# Altium footprint library standard-case.PcbLib: 285 footprints (part 8 of 18)
Each footprint in its own frame and in the unit in brackets; x right, y up, seen from the top. Pads: shape width x height; smd on the part's side, far side on the other; paste and mask are expansions set on the pad; w line width, h text height; cw(c..) or ccw(c..) is an arc to the next point about the centre after c.
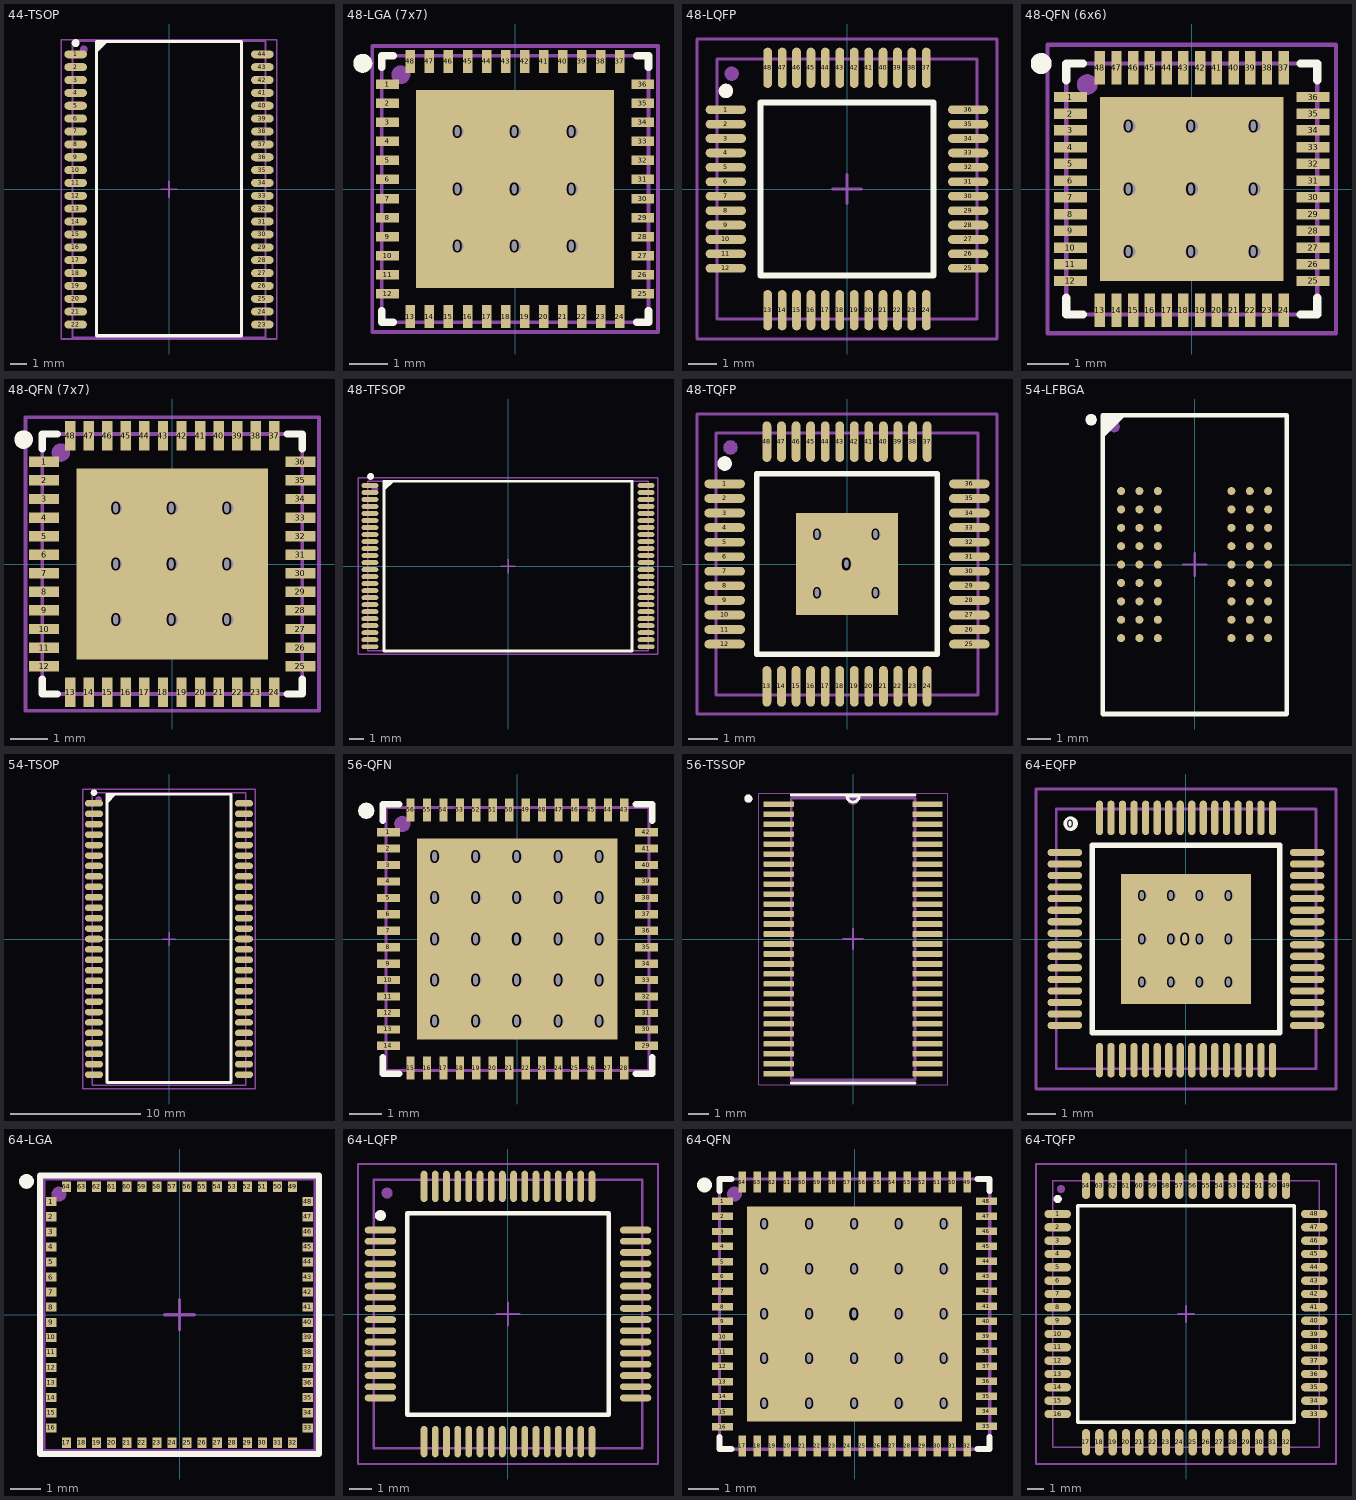
[diagram p7: the footprints below, top view; thin cyan lines are the x and y axes]

## 44-TSOP [mm] "pitch 0.8 mm"
height 5.6
pads (46):
  rrect100% 1.4x0.5 smd: 1(-5.8,8.4) 2(-5.8,7.6) 3(-5.8,6.8) 4(-5.8,6) 5(-5.8,5.2) 6(-5.8,4.4) 7(-5.8,3.6) 8(-5.8,2.8) 9(-5.8,2) 10(-5.8,1.2) 11(-5.8,0.4) 12(-5.8,-0.4) 13(-5.8,-1.2) 14(-5.8,-2) 15(-5.8,-2.8) 16(-5.8,-3.6) 17(-5.8,-4.4) 18(-5.8,-5.2) 19(-5.8,-6) 20(-5.8,-6.8) 21(-5.8,-7.6) 22(-5.8,-8.4) 23(5.8,-8.4) 24(5.8,-7.6) 25(5.8,-6.8) 26(5.8,-6) 27(5.8,-5.2) 28(5.8,-4.4) 29(5.8,-3.6) 30(5.8,-2.8) 31(5.8,-2) 32(5.8,-1.2) 33(5.8,-0.4) 34(5.8,0.4) 35(5.8,1.2) 36(5.8,2) 37(5.8,2.8) 38(5.8,3.6) 39(5.8,4.4) 40(5.8,5.2) 41(5.8,6) 42(5.8,6.8) 43(5.8,7.6) 44(5.8,8.4)
  round 0.5 on Top Overlay: ""(-5.8,9.1)
  round 0.5 on Mech1: ""(-5.3,8.7)
Top Overlay:
  region: -4.5,9.2 -4.5,8.48 -3.78,9.2
  lines w0.2: -4.5,-9.1 4.5,-9.1 4.5,9.2 -4.5,9.2 -4.5,-9.1
Mechanical 1:
  lines w0.1: -6,-9.21 6,-9.21 6,9.21 -6,9.21 -6,-9.21
Mechanical 15:
  lines w0.1: -0.5,0 0.5,0 ; 0,-0.5 0,0.5 ; -6.7,-9.3 -6.7,9.3 6.7,9.3 6.7,-9.3 -6.7,-9.3
3D body "User Library-ISSI TSOP II-44.STEP": height 1.2, standoff 0, extent -5.98,-9.26 5.98,9.26

## 48-LGA (7x7) [mm] "7x7 mm, pitch 0.5 mm, power pad"
height 0.75
pads (59):
  round 0.7 hole 0.3: 0(-1.5,-1.5) 0(-1.5,0) 0(-1.5,1.5) 0(0,-1.5) 0(0,0) 0(0,1.5) 0(1.5,-1.5) 0(1.5,0) 0(1.5,1.5)
  rect 5.2x5.2 smd mask+0.05: 0(0,0)
  rect 0.6x0.25 smd mask+0.05: 1(-3.35,2.75) 2(-3.35,2.25) 3(-3.35,1.75) 4(-3.35,1.25) 5(-3.35,0.75) 6(-3.35,0.25) 7(-3.35,-0.25) 8(-3.35,-0.75) 9(-3.35,-1.25) 10(-3.35,-1.75) 11(-3.35,-2.25) 12(-3.35,-2.75) 25(3.35,-2.75) 26(3.35,-2.25) 27(3.35,-1.75) 28(3.35,-1.25) 29(3.35,-0.75) 30(3.35,-0.25) 31(3.35,0.25) 32(3.35,0.75) 33(3.35,1.25) 34(3.35,1.75) 35(3.35,2.25) 36(3.35,2.75)
  rect 0.25x0.6 smd mask+0.05: 13(-2.75,-3.35) 14(-2.25,-3.35) 15(-1.75,-3.35) 16(-1.25,-3.35) 17(-0.75,-3.35) 18(-0.25,-3.35) 19(0.25,-3.35) 20(0.75,-3.35) 21(1.25,-3.35) 22(1.75,-3.35) 23(2.25,-3.35) 24(2.75,-3.35) 37(2.75,3.35) 38(2.25,3.35) 39(1.75,3.35) 40(1.25,3.35) 41(0.75,3.35) 42(0.25,3.35) 43(-0.25,3.35) 44(-0.75,3.35) 45(-1.25,3.35) 46(-1.75,3.35) 47(-2.25,3.35) 48(-2.75,3.35)
  round 0.5 on Mech1: ""(-3,3)
Top Overlay:
  circle w0.25: c-4,3.3 r0.125
  lines w0.2: -3.5,-3.2 -3.5,-3.5 -3.2,-3.5 ; -3.5,3.2 -3.5,3.5 -3.2,3.5 ; 3.2,-3.5 3.5,-3.5 3.5,-3.2 ; 3.2,3.5 3.5,3.5 3.5,3.2
Mechanical 1:
  lines w0.1: -3.5,-3.5 -3.5,3.5 3.5,3.5 3.5,-3.5 -3.5,-3.5
Mechanical 15:
  lines w0.1: -0.5,0 0.5,0 ; 0,-0.5 0,0.5 ; -3.75,-3.75 -3.75,3.75 3.75,3.75 3.75,-3.75 -3.75,-3.75
3D body "ESP v4.step": height 1, standoff 0.06, extent -3.5,-3.5 3.5,3.5

## 48-LQFP [mm] "QFP, 48-Leads, Body 7x7mm, Pitch 0.5mm, IPC Medium Density"
height 1.6
pads (49):
  oval 1.4x0.3 smd: 1(-4.2,2.75) 2(-4.2,2.25) 3(-4.2,1.75) 4(-4.2,1.25) 5(-4.2,0.75) 6(-4.2,0.25) 7(-4.2,-0.25) 8(-4.2,-0.75) 9(-4.2,-1.25) 10(-4.2,-1.75) 11(-4.2,-2.25) 12(-4.2,-2.75) 25(4.2,-2.75) 26(4.2,-2.25) 27(4.2,-1.75) 28(4.2,-1.25) 29(4.2,-0.75) 30(4.2,-0.25) 31(4.2,0.25) 32(4.2,0.75) 33(4.2,1.25) 34(4.2,1.75) 35(4.2,2.25) 36(4.2,2.75)
  oval 0.3x1.4 smd: 13(-2.75,-4.2) 14(-2.25,-4.2) 15(-1.75,-4.2) 16(-1.25,-4.2) 17(-0.75,-4.2) 18(-0.25,-4.2) 19(0.25,-4.2) 20(0.75,-4.2) 21(1.25,-4.2) 22(1.75,-4.2) 23(2.25,-4.2) 24(2.75,-4.2) 37(2.75,4.2) 38(2.25,4.2) 39(1.75,4.2) 40(1.25,4.2) 41(0.75,4.2) 42(0.25,4.2) 43(-0.25,4.2) 44(-0.75,4.2) 45(-1.25,4.2) 46(-1.75,4.2) 47(-2.25,4.2) 48(-2.75,4.2)
  round 0.5 on Mech1: ""(-4,4)
Top Overlay:
  circle w0.25: c-4.2,3.4 r0.125
  lines w0.2: -3,-3 -3,3 3,3 3,-3 -3,-3
Mechanical 1:
  lines w0.1: -4.5,-4.5 -4.5,4.5 4.5,4.5 4.5,-4.5 -4.5,-4.5
Mechanical 15:
  lines w0.1: -0.5,0 0.5,0 ; 0,-0.5 0,0.5 ; -5.2,-5.2 -5.2,5.2 5.2,5.2 5.2,-5.2 -5.2,-5.2
3D body "STM32F334.step": height 1.6, standoff 0, extent -4.5,-4.5 4.5,4.5

## 48-QFN (6x6) [mm] "6x6 mm, pitch 0.4 mm, power pad"
height 0.85
pads (59):
  round 0.7 hole 0.3: 0(-1.5,-1.5) 0(-1.5,0) 0(-1.5,1.5) 0(0,-1.5) 0(0,0) 0(0,1.5) 0(1.5,-1.5) 0(1.5,0) 0(1.5,1.5)
  rect 4.4x4.4 smd: 0(0,0)
  rect 0.8x0.25 smd: 1(-2.9,2.2) 2(-2.9,1.8) 3(-2.9,1.4) 4(-2.9,1) 5(-2.9,0.6) 6(-2.9,0.2) 7(-2.9,-0.2) 8(-2.9,-0.6) 9(-2.9,-1) 10(-2.9,-1.4) 11(-2.9,-1.8) 12(-2.9,-2.2) 25(2.9,-2.2) 26(2.9,-1.8) 27(2.9,-1.4) 28(2.9,-1) 29(2.9,-0.6) 30(2.9,-0.2) 31(2.9,0.2) 32(2.9,0.6) 33(2.9,1) 34(2.9,1.4) 35(2.9,1.8) 36(2.9,2.2)
  rect 0.25x0.8 smd: 13(-2.2,-2.9) 14(-1.8,-2.9) 15(-1.4,-2.9) 16(-1,-2.9) 17(-0.6,-2.9) 18(-0.2,-2.9) 19(0.2,-2.9) 20(0.6,-2.9) 21(1,-2.9) 22(1.4,-2.9) 23(1.8,-2.9) 24(2.2,-2.9) 37(2.2,2.9) 38(1.8,2.9) 39(1.4,2.9) 40(1,2.9) 41(0.6,2.9) 42(0.2,2.9) 43(-0.2,2.9) 44(-0.6,2.9) 45(-1,2.9) 46(-1.4,2.9) 47(-1.8,2.9) 48(-2.2,2.9)
  round 0.5 on Mech1 mask+0: ""(-2.5,2.5)
Top Overlay:
  circle w0.25: c-3.6,3 r0.125
  lines w0.2: -3,-2.6 -3,-3 -2.6,-3 ; -3,2.6 -3,3 -2.6,3 ; 2.6,-3 3,-3 3,-2.6 ; 2.6,3 3,3 3,2.6
Mechanical 1:
  lines w0.1: -3,-3 -3,3 3,3 3,-3 -3,-3
Mechanical 15:
  lines w0.1: -0.5,0 0.5,0 ; 0,-0.5 0,0.5 ; -3.45,-3.45 -3.45,3.45 3.45,3.45 3.45,-3.45 -3.45,-3.45
3D body "48-VFQFN (6x6).step": height 0.85, standoff 0, extent -3.02,-3.02 3.02,3.02

## 48-QFN (7x7) [mm] "7x7 mm, pitch 0.5 mm, power pad"
height 0.75
pads (59):
  round 0.7 hole 0.3: 0(-1.5,-1.5) 0(-1.5,0) 0(-1.5,1.5) 0(0,-1.5) 0(0,0) 0(0,1.5) 0(1.5,-1.5) 0(1.5,0) 0(1.5,1.5)
  rect 5.15x5.15 smd mask+0.05: 0(0,0)
  rect 0.8x0.28 smd mask+0.05: 1(-3.45,2.75) 2(-3.45,2.25) 3(-3.45,1.75) 4(-3.45,1.25) 5(-3.45,0.75) 6(-3.45,0.25) 7(-3.45,-0.25) 8(-3.45,-0.75) 9(-3.45,-1.25) 10(-3.45,-1.75) 11(-3.45,-2.25) 12(-3.45,-2.75) 25(3.45,-2.75) 26(3.45,-2.25) 27(3.45,-1.75) 28(3.45,-1.25) 29(3.45,-0.75) 30(3.45,-0.25) 31(3.45,0.25) 32(3.45,0.75) 33(3.45,1.25) 34(3.45,1.75) 35(3.45,2.25) 36(3.45,2.75)
  rect 0.28x0.8 smd mask+0.05: 13(-2.75,-3.45) 14(-2.25,-3.45) 15(-1.75,-3.45) 16(-1.25,-3.45) 17(-0.75,-3.45) 18(-0.25,-3.45) 19(0.25,-3.45) 20(0.75,-3.45) 21(1.25,-3.45) 22(1.75,-3.45) 23(2.25,-3.45) 24(2.75,-3.45) 37(2.75,3.45) 38(2.25,3.45) 39(1.75,3.45) 40(1.25,3.45) 41(0.75,3.45) 42(0.25,3.45) 43(-0.25,3.45) 44(-0.75,3.45) 45(-1.25,3.45) 46(-1.75,3.45) 47(-2.25,3.45) 48(-2.75,3.45)
  round 0.5 on Mech1: ""(-3,3)
Top Overlay:
  circle w0.25: c-4,3.35 r0.125
  lines w0.2: -3.5,-3.1 -3.5,-3.5 -3.1,-3.5 ; -3.5,3.1 -3.5,3.5 -3.1,3.5 ; 3.1,-3.5 3.5,-3.5 3.5,-3.1 ; 3.1,3.5 3.5,3.5 3.5,3.1
Mechanical 1:
  lines w0.1: -3.5,-3.5 -3.5,3.5 3.5,3.5 3.5,-3.5 -3.5,-3.5
Mechanical 15:
  lines w0.1: -0.5,0 0.5,0 ; 0,-0.5 0,0.5 ; -3.95,-3.95 -3.95,3.95 3.95,3.95 3.95,-3.95 -3.95,-3.95
3D body "User Library-QFN48_7x7.STEP": height 0.78, standoff -0.02, extent -3.51,-3.51 3.51,3.51

## 48-TFSOP [mm] "pitch 0.5 mm"
height 1.2
pads (50):
  oval 1.2x0.35 smd: 1(-9.85,5.75) 2(-9.85,5.25) 3(-9.85,4.75) 4(-9.85,4.25) 5(-9.85,3.75) 6(-9.85,3.25) 7(-9.85,2.75) 8(-9.85,2.25) 9(-9.85,1.75) 10(-9.85,1.25) 11(-9.85,0.75) 12(-9.85,0.25) 13(-9.85,-0.25) 14(-9.85,-0.75) 15(-9.85,-1.25) 16(-9.85,-1.75) 17(-9.85,-2.25) 18(-9.85,-2.75) 19(-9.85,-3.25) 20(-9.85,-3.75) 21(-9.85,-4.25) 22(-9.85,-4.75) 23(-9.85,-5.25) 24(-9.85,-5.75) 25(9.85,-5.75) 26(9.85,-5.25) 27(9.85,-4.75) 28(9.85,-4.25) 29(9.85,-3.75) 30(9.85,-3.25) 31(9.85,-2.75) 32(9.85,-2.25) 33(9.85,-1.75) 34(9.85,-1.25) 35(9.85,-0.75) 36(9.85,-0.25) 37(9.85,0.25) 38(9.85,0.75) 39(9.85,1.25) 40(9.85,1.75) 41(9.85,2.25) 42(9.85,2.75) 43(9.85,3.25) 44(9.85,3.75) 45(9.85,4.25) 46(9.85,4.75) 47(9.85,5.25) 48(9.85,5.75)
  round 0.5 on Mech1: 2(-9.5,5.5)
  round 0.5 on Top Overlay: ""(-9.8,6.4)
Top Overlay:
  region: -8.85,6.05 -8.85,5.33 -8.13,6.05
  lines w0.2: -8.85,-6.05 -8.85,6.05 8.85,6.05 8.85,-6.05 -8.85,-6.05
Mechanical 1:
  lines w0.1: -10,-6.05 -10,6.05 10,6.05 10,-6.05 -10,-6.05
Mechanical 15:
  lines w0.1: -0.5,0 0.5,0 ; 0,-0.5 0,0.5 ; -10.7,-6.3 -10.7,6.3 10.7,6.3 10.7,-6.3 -10.7,-6.3
3D body "48-TFSOP.step": height 1.2, standoff 0, extent -10,-6.05 10,6.05

## 48-TQFP [mm] "pitch 0.5 mm, power pad"
height 1.2
pads (55):
  round 0.7 hole 0.3: 0(-1,-1) 0(-1,1) 0(0,0) 0(1,-1) 0(1,1)
  rect 3.5x3.5 smd: 0(0,0)
  oval 1.4x0.3 smd: 1(-4.2,2.75) 2(-4.2,2.25) 3(-4.2,1.75) 4(-4.2,1.25) 5(-4.2,0.75) 6(-4.2,0.25) 7(-4.2,-0.25) 8(-4.2,-0.75) 9(-4.2,-1.25) 10(-4.2,-1.75) 11(-4.2,-2.25) 12(-4.2,-2.75) 25(4.2,-2.75) 26(4.2,-2.25) 27(4.2,-1.75) 28(4.2,-1.25) 29(4.2,-0.75) 30(4.2,-0.25) 31(4.2,0.25) 32(4.2,0.75) 33(4.2,1.25) 34(4.2,1.75) 35(4.2,2.25) 36(4.2,2.75)
  oval 0.3x1.4 smd: 13(-2.75,-4.2) 14(-2.25,-4.2) 15(-1.75,-4.2) 16(-1.25,-4.2) 17(-0.75,-4.2) 18(-0.25,-4.2) 19(0.25,-4.2) 20(0.75,-4.2) 21(1.25,-4.2) 22(1.75,-4.2) 23(2.25,-4.2) 24(2.75,-4.2) 37(2.75,4.2) 38(2.25,4.2) 39(1.75,4.2) 40(1.25,4.2) 41(0.75,4.2) 42(0.25,4.2) 43(-0.25,4.2) 44(-0.75,4.2) 45(-1.25,4.2) 46(-1.75,4.2) 47(-2.25,4.2) 48(-2.75,4.2)
  round 0.5 on Mech1: ""(-4,4)
Top Overlay:
  circle w0.25: c-4.2,3.45 r0.125
  lines w0.2: -3.1,-3.1 -3.1,3.1 3.1,3.1 3.1,-3.1 -3.1,-3.1
Mechanical 1:
  lines w0.1: -4.5,-4.5 -4.5,4.5 4.5,4.5 4.5,-4.5 -4.5,-4.5
Mechanical 15:
  lines w0.1: -0.5,0 0.5,0 ; 0,-0.5 0,0.5 ; -5.15,-5.15 -5.15,5.15 5.15,5.15 5.15,-5.15 -5.15,-5.15
3D body "48-TQFP.step": height 1.2, standoff 0, extent -4.5,-4.5 4.5,4.5

## 54-LFBGA [mm] "pitch 0.8 mm"
pads (56):
  round 0.35 smd: A1(-3.2,3.2) A2(-2.4,3.2) A3(-1.6,3.2) A7(1.6,3.2) A8(2.4,3.2) A9(3.2,3.2) B1(-3.2,2.4) B2(-2.4,2.4) B3(-1.6,2.4) B7(1.6,2.4) B8(2.4,2.4) B9(3.2,2.4) C1(-3.2,1.6) C2(-2.4,1.6) C3(-1.6,1.6) C7(1.6,1.6) C8(2.4,1.6) C9(3.2,1.6) D1(-3.2,0.8) D2(-2.4,0.8) D3(-1.6,0.8) D7(1.6,0.8) D8(2.4,0.8) D9(3.2,0.8) E1(-3.2,0) E2(-2.4,0) E3(-1.6,0) E7(1.6,0) E8(2.4,0) E9(3.2,0) F1(-3.2,-0.8) F2(-2.4,-0.8) F3(-1.6,-0.8) F7(1.6,-0.8) F8(2.4,-0.8) F9(3.2,-0.8) G1(-3.2,-1.6) G2(-2.4,-1.6) G3(-1.6,-1.6) G7(1.6,-1.6) G8(2.4,-1.6) G9(3.2,-1.6) H1(-3.2,-2.4) H2(-2.4,-2.4) H3(-1.6,-2.4) H7(1.6,-2.4) H8(2.4,-2.4) H9(3.2,-2.4) J1(-3.2,-3.2) J2(-2.4,-3.2) J3(-1.6,-3.2) J7(1.6,-3.2) J8(2.4,-3.2) J9(3.2,-3.2)
  round 0.5 on Top Overlay: ""(-4.5,6.3)
  round 0.5 on Mech1: ""(-3.5,6)
Top Overlay:
  region: -4,6.5 -4,5.5 -3,6.5
  lines w0.2: -4,-6.5 -4,6.5 4,6.5 4,-6.5 0,-6.5 -4,-6.5
Mechanical 1:
  lines w0.1: -4,-6.5 -4,6.5 4,6.5 4,-6.5 -4,-6.5
Mechanical 15:
  lines w0.1: -0.5,0 0.5,0 ; 0,-0.5 0,0.5 ; -4,-6.5 4,-6.5 4,6.5 -4,6.5 -4,-6.5
3D body "777.STEP": height 1.1, standoff 0, extent -4,-6.5 4,6.5

## 54-TSOP [mm] "pitch 0.8 mm"
height 1.2
pads (55):
  oval 1.4x0.5 smd: 1(-5.75,10.4) 2(-5.75,9.6) 3(-5.75,8.8) 4(-5.75,8) 5(-5.75,7.2) 6(-5.75,6.4) 7(-5.75,5.6) 8(-5.75,4.8) 9(-5.75,4) 10(-5.75,3.2) 11(-5.75,2.4) 12(-5.75,1.6) 13(-5.75,0.8) 14(-5.75,0) 15(-5.75,-0.8) 16(-5.75,-1.6) 17(-5.75,-2.4) 18(-5.75,-3.2) 19(-5.75,-4) 20(-5.75,-4.8) 21(-5.75,-5.6) 22(-5.75,-6.4) 23(-5.75,-7.2) 24(-5.75,-8) 25(-5.75,-8.8) 26(-5.75,-9.6) 27(-5.75,-10.4) 28(5.75,-10.4) 29(5.75,-9.6) 30(5.75,-8.8) 31(5.75,-8) 32(5.75,-7.2) 33(5.75,-6.4) 34(5.75,-5.6) 35(5.75,-4.8) 36(5.75,-4) 37(5.75,-3.2) 38(5.75,-2.4) 39(5.75,-1.6) 40(5.75,-0.8) 41(5.75,0) 42(5.75,0.8) 43(5.75,1.6) 44(5.75,2.4) 45(5.75,3.2) 46(5.75,4) 47(5.75,4.8) 48(5.75,5.6) 49(5.75,6.4) 50(5.75,7.2) 51(5.75,8) 52(5.75,8.8) 53(5.75,9.6) 54(5.75,10.4)
  round 0.5 on Mech1: ""(-5.4,10.7)
Top Overlay:
  circle w0.25: c-5.75,11.225 r0.125
  region: -4.75,11.1 -4.75,10.38 -4.03,11.1
  lines w0.2: -4.75,-11 4.75,-11 4.75,11.1 -4.75,11.1 -4.75,-11
Mechanical 1:
  lines w0.1: -5.88,-11.2 5.88,-11.2 5.88,11.2 -5.88,11.2 -5.88,-11.2
Mechanical 15:
  lines w0.1: -0.5,0 0.5,0 ; 0,-0.5 0,0.5 ; -6.6,-11.5 6.6,-11.5 6.6,11.5 -6.6,11.5 -6.6,-11.5
3D body "TSOP-54.step": height 1.2, standoff 0, extent -5.88,-11.2 5.88,11.2

## 56-QFN [mm] "8x8 mm, pitch 0.5 mm, power pad"
pads (84):
  round 0.7 hole 0.3: 0(-2.5,-2.5) 0(-2.5,-1.25) 0(-2.5,0) 0(-2.5,1.25) 0(-2.5,2.5) 0(-1.25,-2.5) 0(-1.25,-1.25) 0(-1.25,0) 0(-1.25,1.25) 0(-1.25,2.5) 0(0,-2.5) 0(0,-1.25) 0(0,0) 0(0,1.25) 0(0,2.5) 0(1.25,-2.5) 0(1.25,-1.25) 0(1.25,0) 0(1.25,1.25) 0(1.25,2.5) 0(2.5,-2.5) 0(2.5,-1.25) 0(2.5,0) 0(2.5,1.25) 0(2.5,2.5)
  rect 6.1x6.1 smd: 0(0,0)
  rect 0.7x0.25 smd: 1(-3.925,3.25) 2(-3.925,2.75) 3(-3.925,2.25) 4(-3.925,1.75) 5(-3.925,1.25) 6(-3.925,0.75) 7(-3.925,0.25) 8(-3.925,-0.25) 9(-3.925,-0.75) 10(-3.925,-1.25) 11(-3.925,-1.75) 12(-3.925,-2.25) 13(-3.925,-2.75) 14(-3.925,-3.25) 29(3.925,-3.25) 30(3.925,-2.75) 31(3.925,-2.25) 32(3.925,-1.75) 33(3.925,-1.25) 34(3.925,-0.75) 35(3.925,-0.25) 36(3.925,0.25) 37(3.925,0.75) 38(3.925,1.25) 39(3.925,1.75) 40(3.925,2.25) 41(3.925,2.75) 42(3.925,3.25)
  rect 0.25x0.7 smd: 15(-3.25,-3.925) 16(-2.75,-3.925) 17(-2.25,-3.925) 18(-1.75,-3.925) 19(-1.25,-3.925) 20(-0.75,-3.925) 21(-0.25,-3.925) 22(0.25,-3.925) 23(0.75,-3.925) 24(1.25,-3.925) 25(1.75,-3.925) 26(2.25,-3.925) 27(2.75,-3.925) 28(3.25,-3.925) 43(3.25,3.925) 44(2.75,3.925) 45(2.25,3.925) 46(1.75,3.925) 47(1.25,3.925) 48(0.75,3.925) 49(0.25,3.925) 50(-0.25,3.925) 51(-0.75,3.925) 52(-1.25,3.925) 53(-1.75,3.925) 54(-2.25,3.925) 55(-2.75,3.925) 56(-3.25,3.925)
  round 0.5 on Top Overlay: ""(-4.6,3.9)
  round 0.5 on Mech1: ""(-3.5,3.5)
Top Overlay:
  lines w0.2: -4.1,-3.6 -4.1,-4.1 -3.6,-4.1 ; -4.1,3.6 -4.1,4.1 -3.6,4.1 ; 3.6,-4.1 4.1,-4.1 4.1,-3.6 ; 3.6,4.1 4.1,4.1 4.1,3.6
Mechanical 1:
  lines w0.1: -4,4 4,4 4,-4 -4,-4 -4,4
Mechanical 15:
  lines w0.1: -0.5,0 0.5,0 ; 0,-0.5 0,0.5 ; -4,-4 4,-4 4,4 -4,4 -4,-4
3D body "User Library-TQFN56.STEP": height 0.77, standoff 0, extent -4,-4 4,4

## 56-TSSOP [mm] "pitch 0.8 mm"
height 1.2
pads (56):
  rrect25% 1.52x0.28 smd: 1(-3.725,6.75) 2(-3.725,6.25) 3(-3.725,5.75) 4(-3.725,5.25) 5(-3.725,4.75) 6(-3.725,4.25) 7(-3.725,3.75) 8(-3.725,3.25) 9(-3.725,2.75) 10(-3.725,2.25) 11(-3.725,1.75) 12(-3.725,1.25) 13(-3.725,0.75) 14(-3.725,0.25) 15(-3.725,-0.25) 16(-3.725,-0.75) 17(-3.725,-1.25) 18(-3.725,-1.75) 19(-3.725,-2.25) 20(-3.725,-2.75) 21(-3.725,-3.25) 22(-3.725,-3.75) 23(-3.725,-4.25) 24(-3.725,-4.75) 25(-3.725,-5.25) 26(-3.725,-5.75) 27(-3.725,-6.25) 28(-3.725,-6.75) 29(3.725,-6.75) 30(3.725,-6.25) 31(3.725,-5.75) 32(3.725,-5.25) 33(3.725,-4.75) 34(3.725,-4.25) 35(3.725,-3.75) 36(3.725,-3.25) 37(3.725,-2.75) 38(3.725,-2.25) 39(3.725,-1.75) 40(3.725,-1.25) 41(3.725,-0.75) 42(3.725,-0.25) 43(3.725,0.25) 44(3.725,0.75) 45(3.725,1.25) 46(3.725,1.75) 47(3.725,2.25) 48(3.725,2.75) 49(3.725,3.25) 50(3.725,3.75) 51(3.725,4.25) 52(3.725,4.75) 53(3.725,5.25) 54(3.725,5.75) 55(3.725,6.25) 56(3.725,6.75)
Top Overlay:
  circle w0.2: c-5.245,7.03 r0.1
  lines w0.127: -3.1,-7.21 3.1,-7.21 ; -3.1,7.21 3.1,7.21
  lines w0.152: -0.305,7.161 ccw(c0,7.161) 0.305,7.161 -0.305,7.161
Mechanical 13:
  circle w0.2: c-5.245,7.03 r0.1
  lines w0: -0.305,7.061 ccw(c0,7.061) 0.305,7.061 -0.305,7.061
  lines w0.127: -3.1,-7.05 -3.1,7.05 3.1,7.05 3.1,-7.05 -3.1,-7.05
Mechanical 15:
  lines w0.05: -4.735,-7.3 -4.735,7.3 4.735,7.3 4.735,-7.3 -4.735,-7.3
  lines w0.1: -0.5,0 0.5,0 ; 0,-0.5 0,0.5
3D body "SN65HVD09DGG.STEP": height 1.2, standoff 0, extent -4.05,-7 4.05,7

## 64-EQFP [mm] "pitch 0.4 mm, power pad"
pads (79):
  round 0.5 on Mech1: 0(-4,4)
  round 0.7 hole 0.3: 0(-1.5,-1.5) 0(-1.5,0) 0(-1.5,1.5) 0(-0.5,-1.5) 0(-0.5,0) 0(-0.5,1.5) 0(0.5,-1.5) 0(0.5,0) 0(0.5,1.5) 0(1.5,-1.5) 0(1.5,0) 0(1.5,1.5)
  rect 4.5x4.5 smd: 0(0,0)
  oval 1.2x0.25 smd: 1(-4.2,3) 2(-4.2,2.6) 3(-4.2,2.2) 4(-4.2,1.8) 5(-4.2,1.4) 6(-4.2,1) 7(-4.2,0.6) 8(-4.2,0.2) 9(-4.2,-0.2) 10(-4.2,-0.6) 11(-4.2,-1) 12(-4.2,-1.4) 13(-4.2,-1.8) 14(-4.2,-2.2) 15(-4.2,-2.6) 16(-4.2,-3) 33(4.2,-3) 34(4.2,-2.6) 35(4.2,-2.2) 36(4.2,-1.8) 37(4.2,-1.4) 38(4.2,-1) 39(4.2,-0.6) 40(4.2,-0.2) 41(4.2,0.2) 42(4.2,0.6) 43(4.2,1) 44(4.2,1.4) 45(4.2,1.8) 46(4.2,2.2) 47(4.2,2.6) 48(4.2,3)
  oval 0.25x1.2 smd: 17(-3,-4.2) 18(-2.6,-4.2) 19(-2.2,-4.2) 20(-1.8,-4.2) 21(-1.4,-4.2) 22(-1,-4.2) 23(-0.6,-4.2) 24(-0.2,-4.2) 25(0.2,-4.2) 26(0.6,-4.2) 27(1,-4.2) 28(1.4,-4.2) 29(1.8,-4.2) 30(2.2,-4.2) 31(2.6,-4.2) 32(3,-4.2) 49(3,4.2) 50(2.6,4.2) 51(2.2,4.2) 52(1.8,4.2) 53(1.4,4.2) 54(1,4.2) 55(0.6,4.2) 56(0.2,4.2) 57(-0.2,4.2) 58(-0.6,4.2) 59(-1,4.2) 60(-1.4,4.2) 61(-1.8,4.2) 62(-2.2,4.2) 63(-2.6,4.2) 64(-3,4.2)
  round 0.5 on Top Overlay: ""(-4,4)
Top Overlay:
  lines w0.2: -3.25,-3.25 -3.25,3.25 3.25,3.25 3.25,-3.25 -3.25,-3.25
Mechanical 1:
  lines w0.1: -4.5,-4.5 4.5,-4.5 4.5,4.5 -4.5,4.5 -4.5,-4.5
Mechanical 15:
  lines w0.1: -0.5,0 0.5,0 ; 0,-0.5 0,0.5 ; -5.2,-5.2 -5.2,5.2 5.2,5.2 5.2,-5.2 -5.2,-5.2
3D body "User Library-EQFP64-1.STEP": height 0.94, standoff -0.01, extent -4.5,-4.5 4.5,4.5

## 64-LGA [mm] "9x9 mm, pitch 0.5 mm"
pads (66):
  rect 0.35x0.3 smd: 1(-4.25,3.75) 2(-4.25,3.25) 3(-4.25,2.75) 4(-4.25,2.25) 5(-4.25,1.75) 6(-4.25,1.25) 7(-4.25,0.75) 8(-4.25,0.25) 9(-4.25,-0.25) 10(-4.25,-0.75) 11(-4.25,-1.25) 12(-4.25,-1.75) 13(-4.25,-2.25) 14(-4.25,-2.75) 15(-4.25,-3.25) 16(-4.25,-3.75) 33(4.25,-3.75) 34(4.25,-3.25) 35(4.25,-2.75) 36(4.25,-2.25) 37(4.25,-1.75) 38(4.25,-1.25) 39(4.25,-0.75) 40(4.25,-0.25) 41(4.25,0.25) 42(4.25,0.75) 43(4.25,1.25) 44(4.25,1.75) 45(4.25,2.25) 46(4.25,2.75) 47(4.25,3.25) 48(4.25,3.75)
  rect 0.3x0.35 smd: 17(-3.75,-4.25) 18(-3.25,-4.25) 19(-2.75,-4.25) 20(-2.25,-4.25) 21(-1.75,-4.25) 22(-1.25,-4.25) 23(-0.75,-4.25) 24(-0.25,-4.25) 25(0.25,-4.25) 26(0.75,-4.25) 27(1.25,-4.25) 28(1.75,-4.25) 29(2.25,-4.25) 30(2.75,-4.25) 31(3.25,-4.25) 32(3.75,-4.25) 49(3.75,4.25) 50(3.25,4.25) 51(2.75,4.25) 52(2.25,4.25) 53(1.75,4.25) 54(1.25,4.25) 55(0.75,4.25) 56(0.25,4.25) 57(-0.25,4.25) 58(-0.75,4.25) 59(-1.25,4.25) 60(-1.75,4.25) 61(-2.25,4.25) 62(-2.75,4.25) 63(-3.25,4.25) 64(-3.75,4.25)
  round 0.5 on Top Overlay: ""(-5.075,4.425)
  round 0.5 on Mech1: ""(-4,4)
Top Overlay:
  lines w0.2: -4.625,-4.625 4.625,-4.625 4.625,4.625 -4.625,4.625 -4.625,-4.625
Mechanical 1:
  lines w0.1: -4.5,-4.5 4.5,-4.5 4.5,4.5 -4.5,4.5 -4.5,-4.5
Mechanical 15:
  lines w0.1: -0.5,0 0.5,0 ; 0,-0.5 0,0.5 ; -4.5,-4.5 4.5,-4.5 4.5,4.5 -4.5,4.5 -4.5,-4.5
3D body "64-LGA.SLDPRT": height 1.05, standoff 0, extent -4.5,-4.5 4.5,4.5

## 64-LQFP [mm] "Thin QFP, 64-Leads, Body 10x10mm, Pitch 0.5mm, IPC Medium Density"
height 1.6
pads (66):
  oval 1.4x0.3 smd: 1(-5.7,3.75) 2(-5.7,3.25) 3(-5.7,2.75) 4(-5.7,2.25) 5(-5.7,1.75) 6(-5.7,1.25) 7(-5.7,0.75) 8(-5.7,0.25) 9(-5.7,-0.25) 10(-5.7,-0.75) 11(-5.7,-1.25) 12(-5.7,-1.75) 13(-5.7,-2.25) 14(-5.7,-2.75) 15(-5.7,-3.25) 16(-5.7,-3.75) 33(5.7,-3.75) 34(5.7,-3.25) 35(5.7,-2.75) 36(5.7,-2.25) 37(5.7,-1.75) 38(5.7,-1.25) 39(5.7,-0.75) 40(5.7,-0.25) 41(5.7,0.25) 42(5.7,0.75) 43(5.7,1.25) 44(5.7,1.75) 45(5.7,2.25) 46(5.7,2.75) 47(5.7,3.25) 48(5.7,3.75)
  oval 0.3x1.4 smd: 17(-3.75,-5.7) 18(-3.25,-5.7) 19(-2.75,-5.7) 20(-2.25,-5.7) 21(-1.75,-5.7) 22(-1.25,-5.7) 23(-0.75,-5.7) 24(-0.25,-5.7) 25(0.25,-5.7) 26(0.75,-5.7) 27(1.25,-5.7) 28(1.75,-5.7) 29(2.25,-5.7) 30(2.75,-5.7) 31(3.25,-5.7) 32(3.75,-5.7) 49(3.75,5.7) 50(3.25,5.7) 51(2.75,5.7) 52(2.25,5.7) 53(1.75,5.7) 54(1.25,5.7) 55(0.75,5.7) 56(0.25,5.7) 57(-0.25,5.7) 58(-0.75,5.7) 59(-1.25,5.7) 60(-1.75,5.7) 61(-2.25,5.7) 62(-2.75,5.7) 63(-3.25,5.7) 64(-3.75,5.7)
  round 0.5 on Top Overlay: ""(-5.7,4.4)
  round 0.5 on Mech1: ""(-5.4,5.4)
Top Overlay:
  lines w0.2: -4.5,-4.5 -4.5,4.5 4.5,4.5 4.5,-4.5 -4.5,-4.5
Mechanical 1:
  lines w0.1: -6,-6 -6,6 6,6 6,-6 -6,-6
Mechanical 15:
  lines w0.1: -0.5,0 0.5,0 ; 0,-0.5 0,0.5 ; -6.7,-6.7 -6.7,6.7 6.7,6.7 6.7,-6.7 -6.7,-6.7
3D body "stm32g474.step": height 1.6, standoff 0, extent -6,-6 6,6

## 64-QFN [mm] "9x9 mm, pitch 0.5 mm, power pad"
height 0.75
pads (92):
  round 0.7 hole 0.3: 0(-3,-3) 0(-3,-1.5) 0(-3,0) 0(-3,1.5) 0(-3,3) 0(-1.5,-3) 0(-1.5,-1.5) 0(-1.5,0) 0(-1.5,1.5) 0(-1.5,3) 0(0,-3) 0(0,-1.5) 0(0,0) 0(0,1.5) 0(0,3) 0(1.5,-3) 0(1.5,-1.5) 0(1.5,0) 0(1.5,1.5) 0(1.5,3) 0(3,-3) 0(3,-1.5) 0(3,0) 0(3,1.5) 0(3,3)
  rect 7.15x7.15 smd paste-2539.97: 0(0,0)
  rect 0.7x0.25 smd: 1(-4.4,3.75) 2(-4.4,3.25) 3(-4.4,2.75) 4(-4.4,2.25) 5(-4.4,1.75) 6(-4.4,1.25) 7(-4.4,0.75) 8(-4.4,0.25) 9(-4.4,-0.25) 10(-4.4,-0.75) 11(-4.4,-1.25) 12(-4.4,-1.75) 13(-4.4,-2.25) 14(-4.4,-2.75) 15(-4.4,-3.25) 16(-4.4,-3.75) 33(4.4,-3.75) 34(4.4,-3.25) 35(4.4,-2.75) 36(4.4,-2.25) 37(4.4,-1.75) 38(4.4,-1.25) 39(4.4,-0.75) 40(4.4,-0.25) 41(4.4,0.25) 42(4.4,0.75) 43(4.4,1.25) 44(4.4,1.75) 45(4.4,2.25) 46(4.4,2.75) 47(4.4,3.25) 48(4.4,3.75)
  rect 0.25x0.7 smd: 17(-3.75,-4.4) 18(-3.25,-4.4) 19(-2.75,-4.4) 20(-2.25,-4.4) 21(-1.75,-4.4) 22(-1.25,-4.4) 23(-0.75,-4.4) 24(-0.25,-4.4) 25(0.25,-4.4) 26(0.75,-4.4) 27(1.25,-4.4) 28(1.75,-4.4) 29(2.25,-4.4) 30(2.75,-4.4) 31(3.25,-4.4) 32(3.75,-4.4) 49(3.75,4.4) 50(3.25,4.4) 51(2.75,4.4) 52(2.25,4.4) 53(1.75,4.4) 54(1.25,4.4) 55(0.75,4.4) 56(0.25,4.4) 57(-0.25,4.4) 58(-0.75,4.4) 59(-1.25,4.4) 60(-1.75,4.4) 61(-2.25,4.4) 62(-2.75,4.4) 63(-3.25,4.4) 64(-3.75,4.4)
  round 0.5 on Top Overlay: ""(-5,4.3)
  round 0.5 on Mech1: ""(-4,4)
Top Overlay:
  lines w0.2: -4.5,-4.1 -4.5,-4.5 -4.1,-4.5 ; -4.5,4.1 -4.5,4.5 -4.1,4.5 ; 4.1,-4.5 4.5,-4.5 4.5,-4.1 ; 4.1,4.5 4.5,4.5 4.5,4.1
Top Paste:
  region: 3.3,3.3 0.3,3.3 0.3,0.3 3.3,0.3
  region: 3.3,-3.3 3.3,-0.3 0.3,-0.3 0.3,-3.3
  region: -3.3,-3.3 -0.3,-3.3 -0.3,-0.3 -3.3,-0.3
  region: -3.3,3.3 -3.3,0.3 -0.3,0.3 -0.3,3.3
Mechanical 1:
  lines w0.1: -4.5,-4.52 4.52,-4.52 4.52,4.5 -4.5,4.5 -4.5,-4.52
Mechanical 15:
  lines w0.1: -0.2,0 0.1,0 0.2,0 ; 0,-0.2 0,0.2 ; -4.5,-4.5 -4.5,4.5 4.5,4.5 4.5,-4.5 -4.5,-4.5
3D body "MSP432.STEP": height 0.9, standoff 0, extent -4.52,-4.52 4.52,4.52

## 64-TQFP [mm] "pitch 0.8 mm"
height 4
pads (66):
  oval 1.6x0.5 smd: 1(-7.7,6) 2(-7.7,5.2) 3(-7.7,4.4) 4(-7.7,3.6) 5(-7.7,2.8) 6(-7.7,2) 7(-7.7,1.2) 8(-7.7,0.4) 9(-7.7,-0.4) 10(-7.7,-1.2) 11(-7.7,-2) 12(-7.7,-2.8) 13(-7.7,-3.6) 14(-7.7,-4.4) 15(-7.7,-5.2) 16(-7.7,-6) 33(7.7,-6) 34(7.7,-5.2) 35(7.7,-4.4) 36(7.7,-3.6) 37(7.7,-2.8) 38(7.7,-2) 39(7.7,-1.2) 40(7.7,-0.4) 41(7.7,0.4) 42(7.7,1.2) 43(7.7,2) 44(7.7,2.8) 45(7.7,3.6) 46(7.7,4.4) 47(7.7,5.2) 48(7.7,6)
  oval 0.5x1.6 smd: 17(-6,-7.7) 18(-5.2,-7.7) 19(-4.4,-7.7) 20(-3.6,-7.7) 21(-2.8,-7.7) 22(-2,-7.7) 23(-1.2,-7.7) 24(-0.4,-7.7) 25(0.4,-7.7) 26(1.2,-7.7) 27(2,-7.7) 28(2.8,-7.7) 29(3.6,-7.7) 30(4.4,-7.7) 31(5.2,-7.7) 32(6,-7.7) 49(6,7.7) 50(5.2,7.7) 51(4.4,7.7) 52(3.6,7.7) 53(2.8,7.7) 54(2,7.7) 55(1.2,7.7) 56(0.4,7.7) 57(-0.4,7.7) 58(-1.2,7.7) 59(-2,7.7) 60(-2.8,7.7) 61(-3.6,7.7) 62(-4.4,7.7) 63(-5.2,7.7) 64(-6,7.7)
  round 0.5 on Top Overlay: ""(-7.7,6.9)
  round 0.5 on Mech1: ""(-7.5,7.5)
Top Overlay:
  lines w0.2: -6.5,-6.5 6.5,-6.5 6.5,6.5 -6.5,6.5 -6.5,-6.5
Mechanical 1:
  lines w0.1: 8,8 8,-8 -8,-8 -8,8 8,8 ; 8,8 8,8
Mechanical 15:
  lines w0.1: -0.5,0 0.5,0 ; 0,-0.5 0,0.5 ; -9,-9 9,-9 9,9 -9,9 -9,-9
3D body "SW3dPS-atmega64 (tqfp64).STEP": height 1.1, standoff -0.01, extent -8,-8 8,8